# Altium footprint library Connectors.PcbLib: 320 footprints (part 8 of 20)
Each footprint in its own frame and in the unit in brackets; x right, y up, seen from the top. Pads: shape width x height; smd on the part's side, far side on the other; paste and mask are expansions set on the pad; w line width, h text height; cw(c..) or ccw(c..) is an arc to the next point about the centre after c.
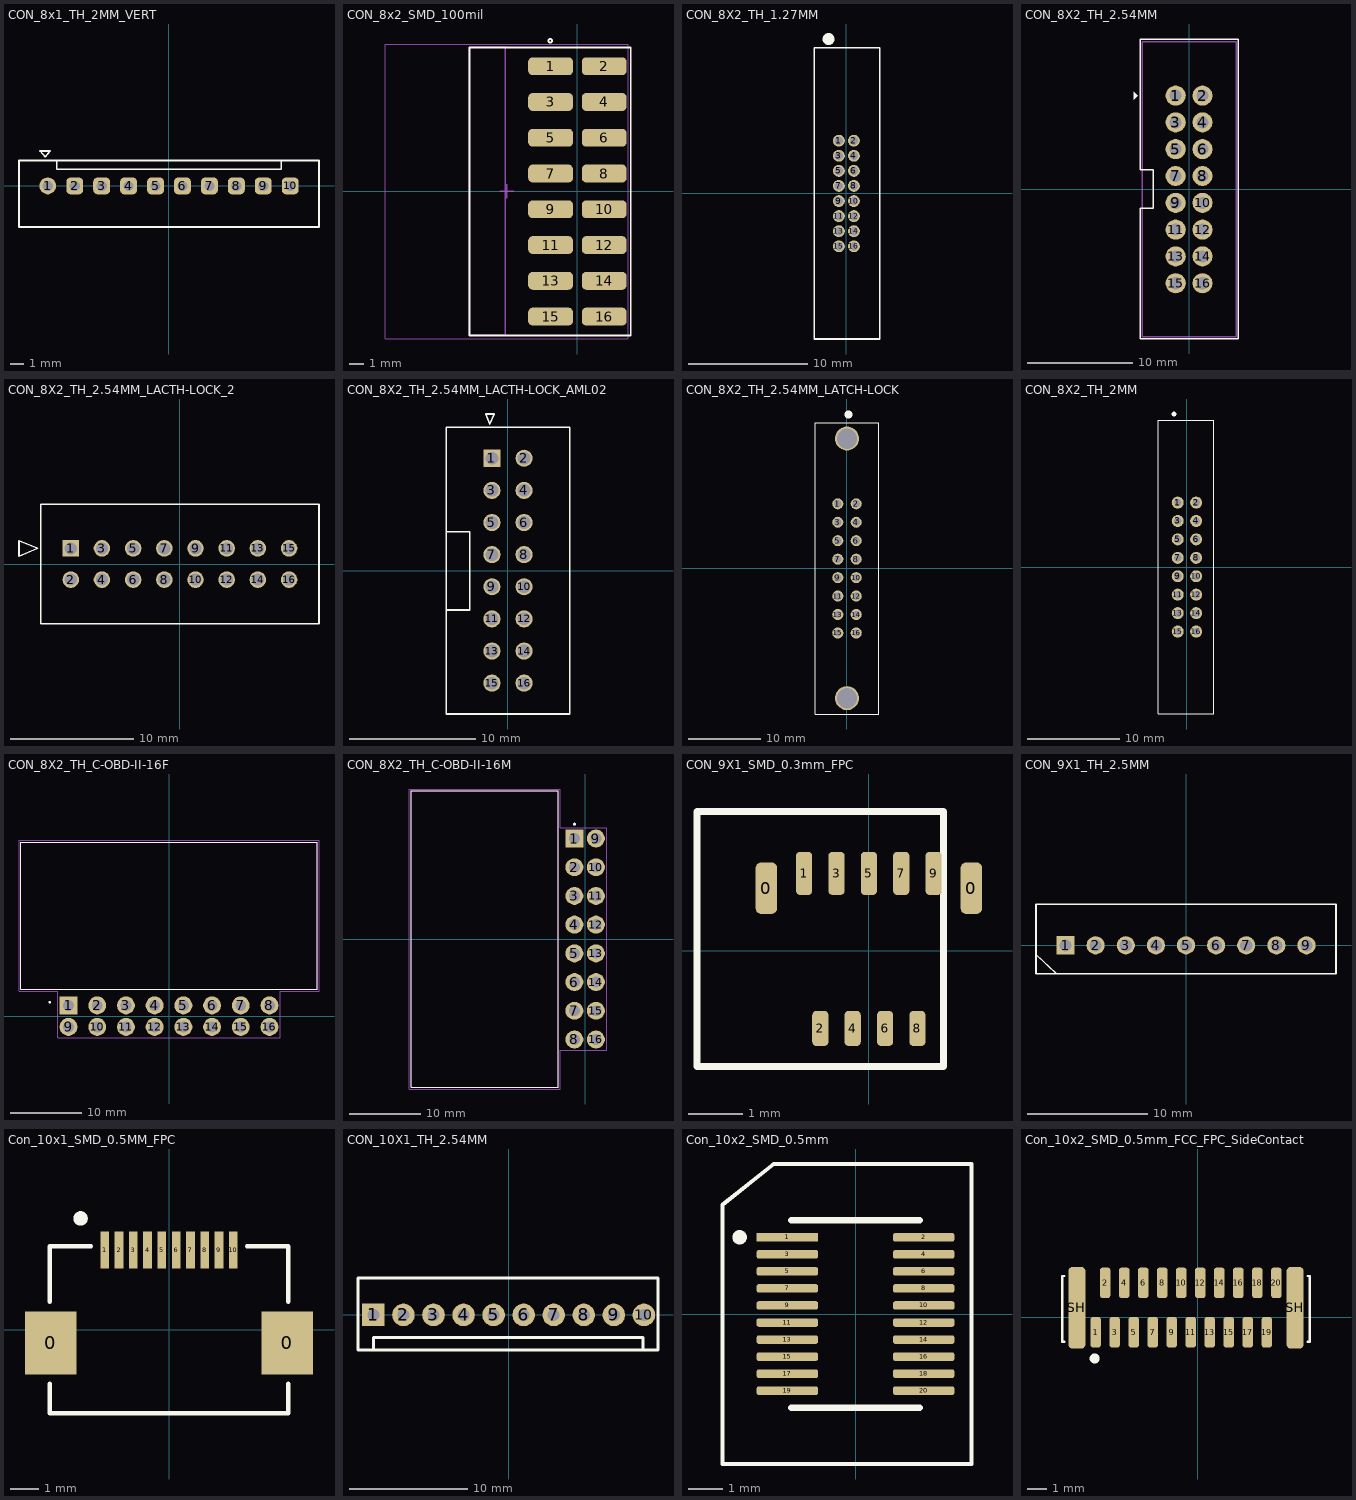
[diagram p7: the footprints below, top view; thin cyan lines are the x and y axes]

## CON_8x1_TH_2MM_VERT [mm] "/ 060726 / J.Jaramillo"
pads (10):
  round 1.25 hole 0.762: 1(-8.99,0)
  rrect50% 1.25x1.25 hole 0.762: 2(-6.99,0) 3(-4.99,0) 4(-2.99,0) 5(-0.99,0) 6(1.01,0) 7(3.01,0) 8(5.01,0) 9(7.01,0) 10(9.01,0)
Top Overlay:
  lines w0.127: -8.32,1.89 -8.32,1.23 8.34,1.23 8.34,1.89 ; -11.126,-3.048 11.146,-3.048 11.146,1.89 -11.126,1.89 -11.126,-3.048 ; -9.57,2.589 -9.174,2.175 -8.808,2.589 -9.57,2.589
3D body "B10B-PH-K-S--3DModel-STEP-56544.STEP": height 6, standoff -3.4, extent -10.95,-2.87 10.95,1.63

## CON_8x2_SMD_100mil [mm] "/ 20190606 / J-P.Vargas.A"
pads (16):
  rrect50% 3.18x1.27 smd: 1(-1.905,8.89) 2(1.905,8.89) 3(-1.905,6.35) 4(1.905,6.35) 5(-1.905,3.81) 6(1.905,3.81) 7(-1.905,1.27) 8(1.905,1.27) 9(-1.905,-1.27) 10(1.905,-1.27) 11(-1.905,-3.81) 12(1.905,-3.81) 13(-1.905,-6.35) 14(1.905,-6.35) 15(-1.905,-8.89) 16(1.905,-8.89)
Top Overlay:
  circle w0.127: c-1.93,10.693 r0.13
  lines w0.127: -7.671,-10.225 3.785,-10.225 3.785,10.225 -7.671,10.225 -7.671,-10.225
Mechanical 1:
  lines w0.1: -7.671,-10.225 -7.671,10.225 -5.131,10.225 -5.131,-10.225 -7.671,-10.225
Mechanical 15:
  lines w0.05: -13.642,-10.45 3.62,-10.45 ; -13.642,10.45 3.62,10.45 ; -13.641,-10.45 -13.641,10.45 ; 3.62,-10.45 3.62,10.45
  lines w0.1: -5.511,0 -4.511,0 ; -5.011,-0.5 -5.011,0.5
3D body "TSM-108-01-X-DH.step": height 6.1, standoff 0, extent -13.517,-10.16 2.739,10.16

## CON_8X2_TH_1.27MM [mm] "20220223 / E.Naranjo"
pads (16):
  round 1 hole 0.7: 1(-0.635,4.445) 2(0.635,4.445) 3(-0.635,3.175) 4(0.635,3.175) 5(-0.635,1.905) 6(0.635,1.905) 7(-0.635,0.635) 8(0.635,0.635) 9(-0.635,-0.635) 10(0.635,-0.635) 11(-0.635,-1.905) 12(0.635,-1.905) 13(-0.635,-3.175) 14(0.635,-3.175) 15(-0.635,-4.445) 16(0.635,-4.445)
Top Overlay:
  circle w1: c-1.5,13 r0.01
  lines w0.127: -2.7,-12.255 -2.7,12.255 2.8,12.255 2.8,-12.255 -2.7,-12.255
3D body "3210-16-001-12-00 3D.STEP": height 11.06, standoff -2.39, extent -2.7,-12.255 2.8,12.255

## CON_8X2_TH_2.54MM [mm] "/20220107/J-E.Pachon"
pads (16):
  round 1.905 hole 1.14: 1(-1.27,8.89) 2(1.27,8.89) 3(-1.27,6.35) 4(1.27,6.35) 5(-1.27,3.81) 6(1.27,3.81) 7(-1.27,1.27) 8(1.27,1.27) 9(-1.27,-1.27) 10(1.27,-1.27) 11(-1.27,-3.81) 12(1.27,-3.81) 13(-1.27,-6.35) 14(1.27,-6.35) 15(-1.27,-8.89) 16(1.27,-8.89)
Top Overlay:
  region: -5.262,9.257 -5.262,8.495 -4.847,8.89
  lines w0.127: -4.648,-14.173 -4.648,-1.803 -3.378,-1.803 -3.378,1.854 -4.648,1.854 -4.648,14.249 4.674,14.249 4.674,-14.173 -4.648,-14.173
Mechanical 1:
  lines w0.127: -4.42,-13.945 4.47,-13.945 4.47,13.995 -4.42,13.995 -4.42,-13.945
3D body "702461604.stp": height 9.28, standoff -3.42, extent -4.42,-13.945 4.47,13.995

## CON_8X2_TH_2.54MM_LACTH-LOCK_2 [mm] "20220225 / E.Naranjo"
pads (16):
  rect 1.35x1.35 hole 1 mask+0.076: 1(-8.89,1.27)
  round 1.35 hole 1 mask+0.076: 2(-8.89,-1.27) 3(-6.35,1.27) 4(-6.35,-1.27) 5(-3.81,1.27) 6(-3.81,-1.27) 7(-1.27,1.27) 8(-1.27,-1.27) 9(1.27,1.27) 10(1.27,-1.27) 11(3.81,1.27) 12(3.81,-1.27) 13(6.35,1.27) 14(6.35,-1.27) 15(8.89,1.27) 16(8.89,-1.27)
Top Overlay:
  lines w0.127: -13.108,0.635 -11.584,1.27 -13.108,1.905 -13.108,0.635 ; -11.33,-4.875 11.33,-4.875 11.33,4.875 -11.33,4.875 -11.33,-4.875
3D body "901301116.stp": height 10.06, standoff -3.74, extent -11.33,-4.875 11.33,4.875
3D body: height 0.25, standoff 0, extent -8.89,1.27 -8.636,1.524

## CON_8X2_TH_2.54MM_LACTH-LOCK_AML02 [mm] "20220322 /J-E.Pachon"
pads (16):
  rect 1.35x1.35 hole 1 mask+0.076: 1(-1.27,8.89)
  round 1.35 hole 1 mask+0.076: 2(1.27,8.89) 3(-1.27,6.35) 4(1.27,6.35) 5(-1.27,3.81) 6(1.27,3.81) 7(-1.27,1.27) 8(1.27,1.27) 9(-1.27,-1.27) 10(1.27,-1.27) 11(-1.27,-3.81) 12(1.27,-3.81) 13(-1.27,-6.35) 14(1.27,-6.35) 15(-1.27,-8.89) 16(1.27,-8.89)
Top Overlay:
  lines w0.127: -4.863,-3.11 -3.03,-3.11 -3.03,3.09 -4.859,3.09 ; -4.875,-11.33 -4.875,11.33 4.875,11.33 4.875,-11.33 -4.875,-11.33 ; -1.766,12.39 -1.43,11.584 -1.094,12.39 -1.766,12.39
3D body: height 0.25, standoff 0, extent 1.27,8.636 1.524,8.89
3D body "901301116.stp": height 10.06, standoff -3.74, extent -4.875,-11.33 4.875,11.33

## CON_8X2_TH_2.54MM_LATCH-LOCK [mil] "20220222 / E.Naranjo"
pads (18):
  round 60 hole 40 mask+0: 1(-50,350) 2(50,350) 3(-50,250) 4(50,250) 5(-50,150) 6(50,150) 7(-50,50) 8(50,50) 9(-50,-50) 10(50,-50) 11(-50,-150) 12(50,-150) 13(-50,-250) 14(50,-250) 15(-50,-350) 16(50,-350)
  round 130 hole 110 paste-99999 mask+0: ""(0,-703.15)
  round 130 hole 110 mask+0: ""(0,703.15)
Top Overlay:
  circle w39.37: c7.87,834.65 r1.97
  lines w6: -172.5,-789 172.5,-789 172.5,789 -172.5,789 -172.5,-789
3D body: height 10, standoff 0, extent 50,340 60,350
3D body "header_awh16g-0232-t.stp": height 1086.61, standoff -129.93, extent -154.27,-777.95 172.5,777.95

## CON_8X2_TH_2MM [mm] "20220222 / E.Naranjo"
pads (16):
  round 1.3 hole 0.8: 1(-1,7) 2(1,7) 3(-1,5) 4(1,5) 5(-1,3) 6(1,3) 7(-1,1) 8(1,1) 9(-1,-1) 10(1,-1) 11(-1,-3) 12(1,-3) 13(-1,-5) 14(1,-5) 15(-1,-7) 16(1,-7)
Top Overlay:
  circle w0.5: c-1.4,16.6 r0.01
  lines w0.127: -3.1,-15.95 2.9,-15.95 2.9,15.95 -3.1,15.95 -3.1,-15.95
3D body "CONN HEADER VERT 16POS 2MM - 3110-16-001-13-00-ND v1.step": height 21.09, standoff -2.9, extent -3.1,-17.914 2.9,17.915

## CON_8X2_TH_C-OBD-II-16F [mm] "/ 20201214 / M-C.Calderon"
pads (16):
  rect 2.5x2.5 hole 1.524: 1(-14,1.5)
  round 2.5 hole 1.524: 2(-10,1.5) 3(-6,1.5) 4(-2,1.5) 5(2,1.5) 6(6,1.5) 7(10,1.5) 8(14,1.5) 9(-14,-1.5) 10(-10,-1.5) 11(-6,-1.5) 12(-2,-1.5) 13(2,-1.5) 14(6,-1.5) 15(10,-1.5) 16(14,-1.5)
Top Overlay:
  circle w0.2: c-16.61,1.94 r0.1
  lines w0.127: -20.65,3.75 -20.65,24.25 20.65,24.25 20.65,3.75 -20.65,3.75
Top 3D Body (Mech13):
  circle w0.2: c-16.61,1.94 r0.1
  lines w0.127: -20.65,3.75 -20.65,24.25 20.65,24.25 20.65,3.75 -20.65,3.75
Mechanical 15:
  lines w0.05: -20.9,3.5 -15.5,3.5 -15.5,-3 15.5,-3 15.5,3.5 20.9,3.5 20.9,24.5 -20.9,24.5 -20.9,3.5
3D body "CCBDF20.STEP": height 17.56, standoff -0.74, extent -20.09,-2.01 20.406,27.79

## CON_8X2_TH_C-OBD-II-16M [mm] "/ 20201228 / M-C.Calderon"
pads (16):
  rect 2.5x2.5 hole 1.524: 1(-1.5,14)
  round 2.5 hole 1.524: 2(-1.5,10) 3(-1.5,6) 4(-1.5,2) 5(-1.5,-2) 6(-1.5,-6) 7(-1.5,-10) 8(-1.5,-14) 9(1.5,14) 10(1.5,10) 11(1.5,6) 12(1.5,2) 14(1.5,-6) 15(1.5,-10) 16(1.5,-14)
  round 2.5 hole 1.5: 13(1.5,-2)
Top Overlay:
  circle w0.2: c-1.5,16 r0.1
  lines w0.127: -24.25,-20.65 -24.25,20.65 -3.75,20.65 -3.75,-20.65 -24.25,-20.65
Top 3D Body (Mech13):
  circle w0.2: c-1.5,16 r0.1
  lines w0.127: -24.25,-20.65 -24.25,20.65 -3.75,20.65 -3.75,-20.65 -24.25,-20.65
Mechanical 15:
  lines w0.05: -24.5,-20.9 -3.5,-20.9 -3.5,-15.5 3,-15.5 3,15.5 -3.5,15.5 -3.5,20.9 -24.5,20.9 -24.5,-20.9
3D body "COMTECH_OBD-II-16M-E-N-12V_RA.STEP": height 18.92, standoff 0.01, extent -24.13,-20.195 2.02,20.355

## CON_9X1_SMD_0.3mm_FPC [mm] "20211217 / E.Naranjo"
pads (11):
  rrect50% 0.4x0.95 smd: 0(-1.9,1.162) 0(1.9,1.162)
  rrect50% 0.3x0.8 smd: 1(-1.2,1.438) 3(-0.6,1.438) 5(0,1.438) 7(0.6,1.438) 9(1.2,1.438)
  rrect50% 0.3x0.65 smd: 2(-0.9,-1.438) 4(-0.3,-1.438) 6(0.3,-1.438) 8(0.9,-1.438)
Top Overlay:
  lines w0.127: -3.186,-2.142 1.386,-2.142 1.386,2.583 -3.186,2.583 -3.186,-2.142
3D body "FH35C-9S-0.3SHW-99---3DModel-STEP-1.STEP": height 0.9, standoff 0, extent -2.15,-2.507 2.15,1.694

## CON_9X1_TH_2.5MM [mm] "20220608 / E.Naranjo"
pads (9):
  rect 1.508x1.508 hole 1: 1(-10,0)
  round 1.508 hole 1: 2(-7.5,0) 3(-5,0) 4(-2.5,0) 5(0,0) 6(2.5,0) 7(5,0) 8(7.5,0) 9(10,0)
Top Overlay:
  lines w0.127: -12.45,-0.754 -10.754,-2.35 ; -12.45,-2.35 12.45,-2.35 12.45,3.4 -12.45,3.4 -12.45,-2.35
3D body "B9B-XH-A-LF--SN---3DModel-STEP-418109.STEP": height 6.51, standoff -3.89, extent -12.45,-2.375 12.45,3.375

## Con_10x1_SMD_0.5MM_FPC [mil] "/20230907/J-E.Pachon"
pads (12):
  rect 71x87 smd: 0(-163.39,-17.95) 0(163.39,-17.95)
  rect 12x51 smd: 1(-88.58,110) 2(-68.9,110) 3(-49.21,110) 4(-29.53,110) 5(-9.84,110) 6(9.84,110) 7(29.53,110) 8(49.21,110) 9(68.9,110) 10(88.58,110)
Top Overlay:
  circle w10: c-122.05,153.54 r5
  lines w6: -164.5,-74.55 -164.5,-115 164.5,-115 164.5,-74.55 ; -164.5,38.65 -164.5,115 -107.68,115 ; 107.68,115 164.5,115 164.5,38.65
3D body "FH12-10S-0.5SH.stp": height 83.86, standoff 1.06, extent -179.15,-129.92 179.15,122.05

## CON_10X1_TH_2.54MM [mil] "/20200110/V-A.Patino"
pads (10):
  rect 75x75 hole 40: 1(-450,0)
  round 75 hole 40: 2(-350,0) 3(-250,0) 4(-150,0) 5(-50,0) 6(50,0) 7(150,0) 8(250,0) 9(350,0) 10(450,0)
Top Overlay:
  lines w10: -450,-115.35 -450,-75 446.85,-75 446.85,-114.96 ; -501.18,-116.14 -501.18,122.05 496.92,122.05 496.92,-116.14 -501.18,-116.14
3D body "022232101.stp": height 420.49, standoff -139.51, extent -497.08,-122.43 496.92,127.57

## Con_10x2_SMD_0.5mm [mm] "/20230217/N-A.potosi"
pads (20):
  rect 1.8x0.25 smd: 1(-2,2.25)
  rrect50% 1.8x0.25 smd: 2(2,2.25) 3(-2,1.75) 4(2,1.75) 5(-2,1.25) 6(2,1.25) 7(-2,0.75) 8(2,0.75) 9(-2,0.25) 10(2,0.25) 11(-2,-0.25) 12(2,-0.25) 13(-2,-0.75) 14(2,-0.75) 15(-2,-1.25) 16(2,-1.25) 17(-2,-1.75) 18(2,-1.75) 19(-2,-2.25) 20(2,-2.25)
Top Overlay:
  circle w0.127: c-3.4,2.25 r0.15
  lines w0.127: -3.349,2.279 ccw(c-3.4,2.25) -3.341,2.25 ; -3.9,-4.4 -3.9,3.2 -2.4,4.4 3.4,4.4 3.4,-4.4 -3.9,-4.4
  lines w0.203: -1.875,-2.75 1.875,-2.75 ; -1.875,2.75 1.875,2.75
3D body "541670208.stp": height 2.33, standoff 0.01, extent -2.7,-4.4 2.7,4.4

## Con_10x2_SMD_0.5mm_FCC_FPC_SideContact [mm] "/ 160726 /  J.Jaramillo"
pads (22):
  rrect50% 0.55x1.6 smd: 1(-5.36,-0.778) 2(-4.86,1.822) 3(-4.36,-0.778) 4(-3.86,1.822) 5(-3.36,-0.778) 6(-2.86,1.822) 7(-2.36,-0.778) 8(-1.86,1.822) 9(-1.36,-0.778) 10(-0.86,1.822) 11(-0.36,-0.778) 12(0.14,1.822) 13(0.64,-0.778) 14(1.14,1.822) 15(1.64,-0.778) 16(2.14,1.822) 17(2.64,-0.778) 18(3.14,1.822) 19(3.64,-0.778) 20(4.14,1.822)
  rrect50% 0.9x4.3 smd: SH(-6.35,0.508) SH(5.13,0.508)
Top Overlay:
  circle w0.254: c-5.415,-2.157 r0.138
  lines w0.127: -7,-1.27 -7.112,-1.27 -7.112,2.179 -7,2.179 ; 5.78,-1.27 5.892,-1.27 5.892,2.179 5.78,2.179
Top Solder:
  circle w0.254: c-5.415,-2.157 r0.138
3D body "step_temp.STEP": height 4.25, standoff 0, extent -9.16,-1.203 7.94,2.272